# Altium footprint library Capacitors.PcbLib: 3 footprints
Each footprint in its own frame and in the unit in brackets; x right, y up, seen from the top. Pads: shape width x height; smd on the part's side, far side on the other; paste and mask are expansions set on the pad; w line width, h text height; cw(c..) or ccw(c..) is an arc to the next point about the centre after c.
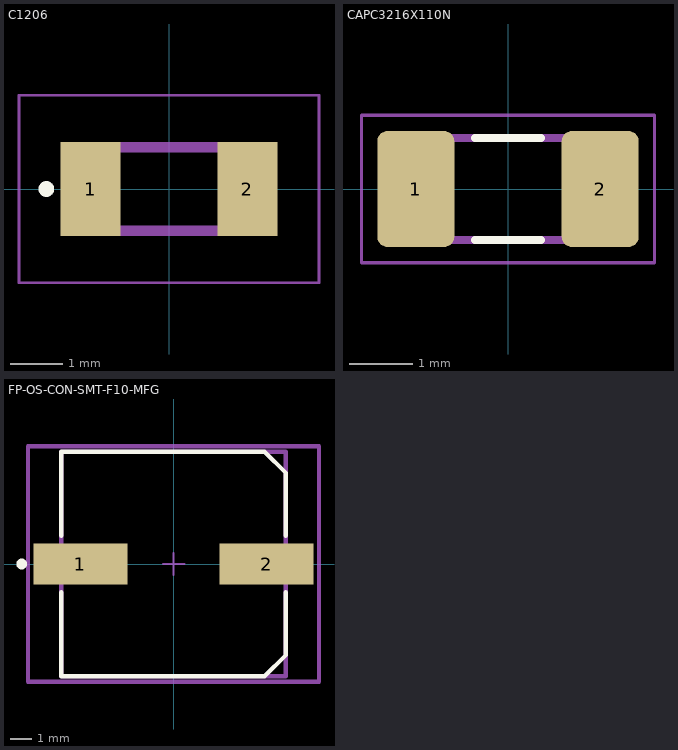
[diagram p0: the footprints below, top view; thin cyan lines are the x and y axes]

## C1206 [mm]
pads (2):
  rect 1.15x1.8 smd: 1(-1.5,0) 2(1.5,0)
Top Overlay:
  circle w0.2: c-2.35,0 r0.05
Top 3D Body:
  lines w0.2: -1.6,-0.8 -1.6,0.8 1.6,0.8 1.6,-0.8 -1.6,-0.8
Top Courtyard:
  lines w0.05: -2.875,-1.8 -2.875,1.8 2.875,1.8 2.875,-1.8 -2.875,-1.8
3D body "C1206C106M8PACTU.stp": height 1.8, standoff 0, extent -1.7,-0.9 1.7,0.9

## CAPC3216X110N [mm]
pads (2):
  rrect25% 1.21x1.82 smd: 1(-1.45,0) 2(1.45,0)
Top Overlay:
  lines w0.127: -0.52,-0.8 0.52,-0.8 ; -0.52,0.8 0.52,0.8
Top 3D Body:
  lines w0.127: -1.6,-0.8 -1.6,0.8 1.6,0.8 1.6,-0.8 -1.6,-0.8
Top Courtyard:
  lines w0.05: -2.305,-1.16 -2.305,1.16 2.305,1.16 2.305,-1.16 -2.305,-1.16
3D body "step_temp.STEP": height 0.85, standoff 0, extent -1.6,-0.8 1.6,0.8

## FP-OS-CON-SMT-F10-MFG [mm]
pads (2):
  rect 4.4x1.9 smd paste+0 mask+0: 1(-4.35,0) 2(4.35,0)
Top Overlay:
  circle w0.25: c-7.1,0 r0.125
  lines w0.2: -5.25,-1.325 -5.25,-5.25 4.25,-5.25 5.25,-4.25 5.25,-1.325 ; -5.25,1.325 -5.25,5.25 4.25,5.25 5.25,4.25 5.25,1.325
Top Assembly:
  lines w0.2: -6.8,-5.5 6.8,-5.5 6.8,5.5 -6.8,5.5 -6.8,-5.5
  text ".Designator" at 0,0.188 h1
Top 3D Body:
  lines w0.2: -5.25,-5.25 5.25,-5.25 5.25,5.25 -5.25,5.25 -5.25,-5.25
Top Courtyard:
  lines w0.2: -6.8,-5.5 6.8,-5.5 6.8,5.5 -6.8,5.5 -6.8,-5.5
Top Component Center:
  lines w0.1: -0.5,0 0.5,0 ; 0,-0.5 0,0.5
3D body "Cap_Panasonic_16SVF1000MX_eec.STEP": height 0.25, standoff 0, extent -6.8,-5.5 6.8,5.5